# Altium footprint library ACB_PcbLib.PcbLib: 167 footprints (part 1 of 11)
Each footprint in its own frame and in the unit in brackets; x right, y up, seen from the top. Pads: shape width x height; smd on the part's side, far side on the other; paste and mask are expansions set on the pad; w line width, h text height; cw(c..) or ccw(c..) is an arc to the next point about the centre after c.
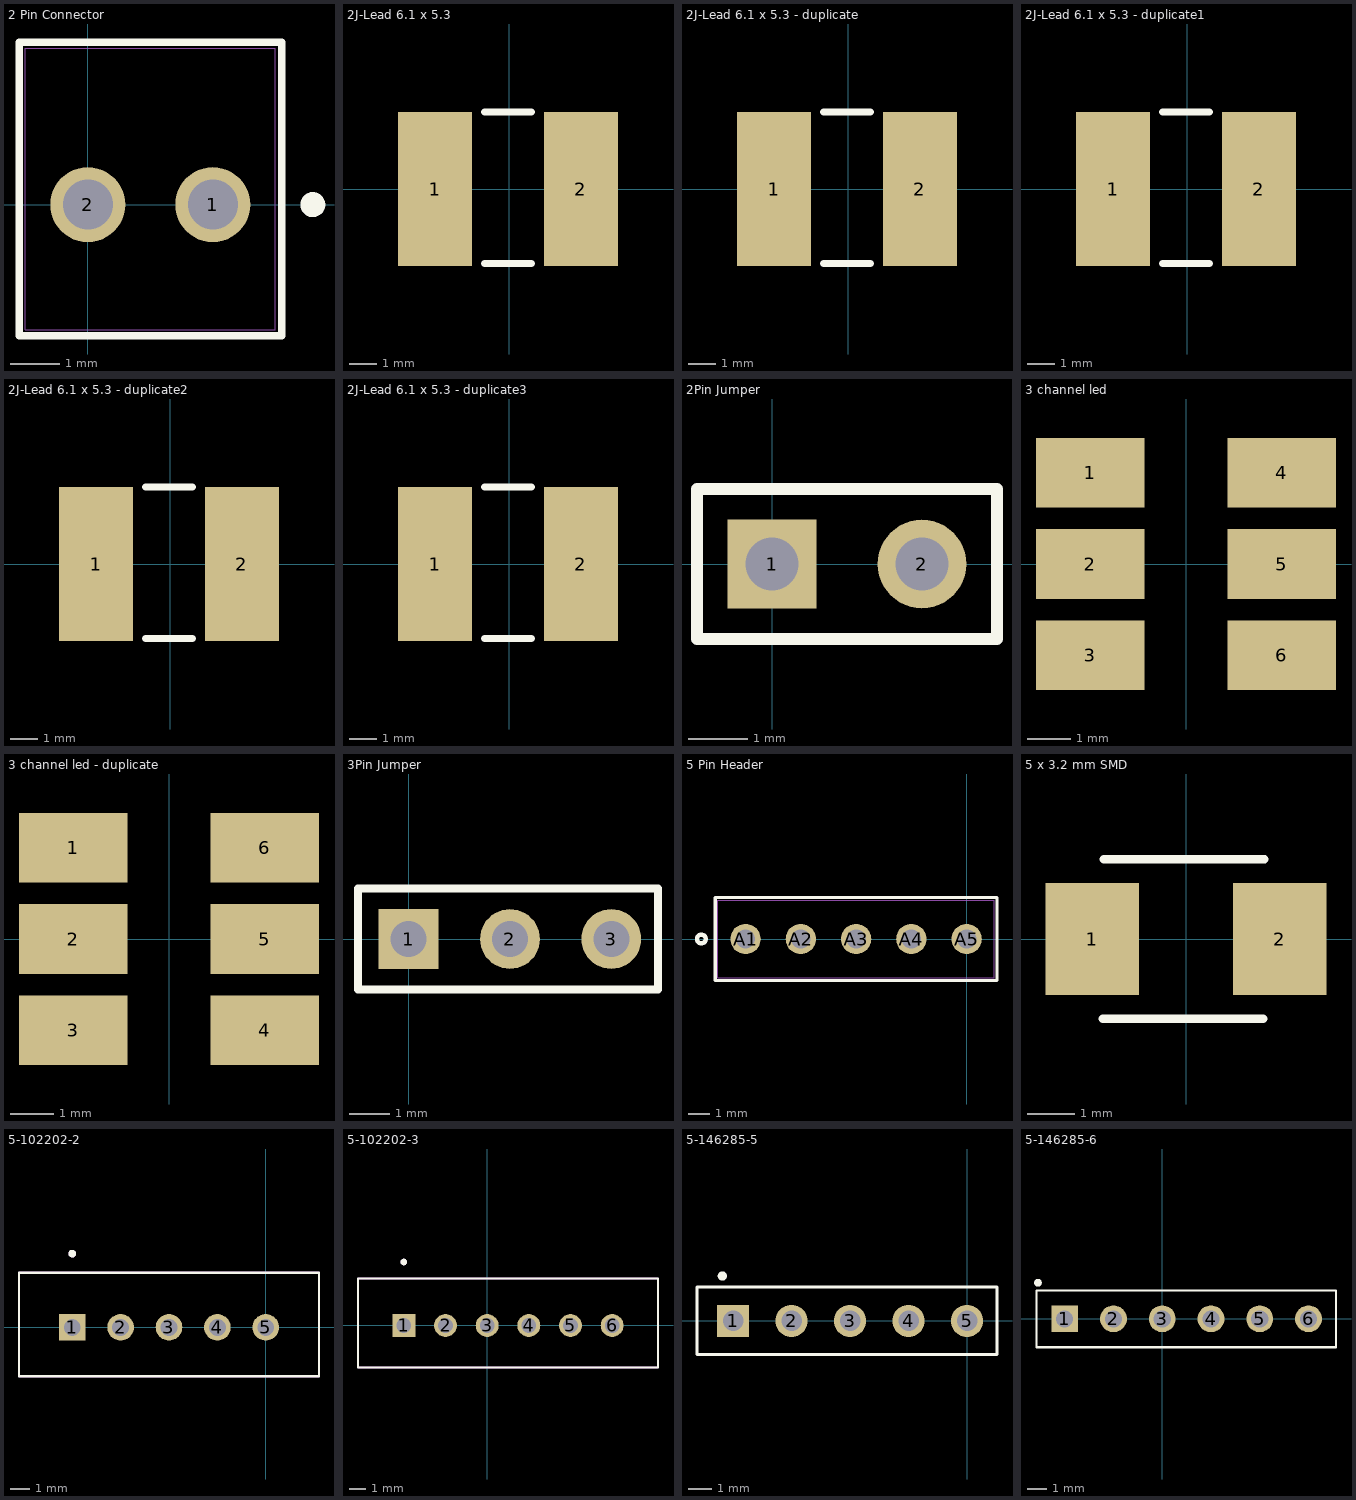
[diagram p0: the footprints below, top view; thin cyan lines are the x and y axes]

## 2 Pin Connector [mil] "640456-2 TE Connectivity"
pads (2):
  round 60 hole 40 mask-1000: 1(100,0) 2(0,0)
Top Overlay:
  circle w10: c180,0 r5
  lines w6: -55,-105 -55,130 155,130 155,-105 -55,-105
Bottom Overlay:
  circle w10: c180,0 r5
Top Paste:
  region: 0,30.26 -7.83,29.23 -15.13,26.2 -21.4,21.4 -26.2,15.13 -29.23,7.83 -30.26,0 -29.23,-7.83 -26.2,-15.13 -21.4,-21.4 -15.13,-26.2 -7.83,-29.23 0,-30.26 7.83,-29.23 15.13,-26.2 21.4,-21.4 26.2,-15.13 29.23,-7.83 30.26,0 29.23,7.83 26.2,15.13 21.4,21.4 15.13,26.2 7.83,29.23
  region: 100,30.26 92.17,29.23 84.87,26.2 78.6,21.4 73.8,15.13 70.77,7.83 69.74,0 70.77,-7.83 73.8,-15.13 78.6,-21.4 84.87,-26.2 92.17,-29.23 100,-30.26 107.83,-29.23 115.13,-26.2 121.4,-21.4 126.2,-15.13 129.23,-7.83 130.26,0 129.23,7.83 126.2,15.13 121.4,21.4 115.13,26.2 107.83,29.23
Top Solder:
  region: 0,30.26 -7.83,29.23 -15.13,26.2 -21.4,21.4 -26.2,15.13 -29.23,7.83 -30.26,0 -29.23,-7.83 -26.2,-15.13 -21.4,-21.4 -15.13,-26.2 -7.83,-29.23 0,-30.26 7.83,-29.23 15.13,-26.2 21.4,-21.4 26.2,-15.13 29.23,-7.83 30.26,0 29.23,7.83 26.2,15.13 21.4,21.4 15.13,26.2 7.83,29.23
  region: 100,30.26 92.17,29.23 84.87,26.2 78.6,21.4 73.8,15.13 70.77,7.83 69.74,0 70.77,-7.83 73.8,-15.13 78.6,-21.4 84.87,-26.2 92.17,-29.23 100,-30.26 107.83,-29.23 115.13,-26.2 121.4,-21.4 126.2,-15.13 129.23,-7.83 130.26,0 129.23,7.83 126.2,15.13 121.4,21.4 115.13,26.2 107.83,29.23
Bottom Solder:
  region: 0,30.26 -7.83,29.23 -15.13,26.2 -21.4,21.4 -26.2,15.13 -29.23,7.83 -30.26,0 -29.23,-7.83 -26.2,-15.13 -21.4,-21.4 -15.13,-26.2 -7.83,-29.23 0,-30.26 7.83,-29.23 15.13,-26.2 21.4,-21.4 26.2,-15.13 29.23,-7.83 30.26,0 29.23,7.83 26.2,15.13 21.4,21.4 15.13,26.2 7.83,29.23
  region: 100,30.26 92.17,29.23 84.87,26.2 78.6,21.4 73.8,15.13 70.77,7.83 69.74,0 70.77,-7.83 73.8,-15.13 78.6,-21.4 84.87,-26.2 92.17,-29.23 100,-30.26 107.83,-29.23 115.13,-26.2 121.4,-21.4 126.2,-15.13 129.23,-7.83 130.26,0 129.23,7.83 126.2,15.13 121.4,21.4 115.13,26.2 107.83,29.23
Mechanical 1:
  lines w1: -50,-100 -50,125 150,125 150,-100 -50,-100
3D body "c-640456-2-aa-3d.stp": height 400, standoff -135, extent -50.78,-106.75 149.22,123.25

## 2J-Lead 6.1 x 5.3 [mm]
pads (2):
  rect 2.7x5.6 smd: 1(-2.7,0) 2(2.6,0)
Top Overlay:
  lines w0.254: -0.9,-2.7 0.8,-2.7 ; -0.9,2.8 0.8,2.8
3D body: height 5, standoff 0.06, extent -3.4,-2.8 3.3,2.8

## 2J-Lead 6.1 x 5.3 - duplicate [mm]
pads (2):
  rect 2.7x5.6 smd: 1(-2.7,0) 2(2.6,0)
Top Overlay:
  lines w0.254: -0.9,-2.7 0.8,-2.7 ; -0.9,2.8 0.8,2.8
3D body: height 5, standoff 0.06, extent -3.4,-2.8 3.3,2.8

## 2J-Lead 6.1 x 5.3 - duplicate1 [mm]
pads (2):
  rect 2.7x5.6 smd: 1(-2.7,0) 2(2.6,0)
Top Overlay:
  lines w0.254: -0.9,-2.7 0.8,-2.7 ; -0.9,2.8 0.8,2.8
3D body: height 5, standoff 0.06, extent -3.4,-2.8 3.3,2.8

## 2J-Lead 6.1 x 5.3 - duplicate2 [mm]
pads (2):
  rect 2.7x5.6 smd: 1(-2.7,0) 2(2.6,0)
Top Overlay:
  lines w0.254: -0.9,-2.7 0.8,-2.7 ; -0.9,2.8 0.8,2.8
3D body: height 5, standoff 0.06, extent -3.4,-2.8 3.3,2.8

## 2J-Lead 6.1 x 5.3 - duplicate3 [mm]
pads (2):
  rect 2.7x5.6 smd: 1(-2.7,0) 2(2.6,0)
Top Overlay:
  lines w0.254: -0.9,-2.7 0.8,-2.7 ; -0.9,2.8 0.8,2.8
3D body: height 5, standoff 0.06, extent -3.4,-2.8 3.3,2.8

## 2Pin Jumper [mm] "2 Pin quick jumper"
pads (2):
  rect 1.5x1.5 hole 0.9: 1(0,0)
  round 1.5 hole 0.9: 2(2.54,0)
Top Overlay:
  lines w0.2: -1.27,-1.27 3.81,-1.27 3.81,1.27 -1.27,1.27 -1.27,-1.27
3D body "Pin Header 1x2 TH Pitch 2.54mm.stp": height 9.5, standoff -3.2, extent -1.27,-1.27 3.81,1.27

## 3 channel led [mm]
pads (6):
  rect 2.5x1.6 smd: 1(-2.2,2.1) 2(-2.2,0) 3(-2.2,-2.1) 4(2.2,2.1) 5(2.2,0) 6(2.2,-2.1)
3D body: height 2.5, standoff 0, extent -2.1,-2.8 2.2,2.8

## 3 channel led - duplicate [mm]
pads (6):
  rect 2.5x1.6 smd: 1(-2.2,2.1) 2(-2.2,0) 3(-2.2,-2.1) 4(2.2,-2.1) 5(2.2,0) 6(2.2,2.1)
3D body: height 2.5, standoff 0, extent -2.1,-2.8 2.2,2.8

## 3Pin Jumper [mm] "3 Pin quick jumper"
pads (3):
  rect 1.5x1.5 hole 0.9: 1(0,0)
  round 1.5 hole 0.9: 2(2.54,0) 3(5.08,0)
Top Overlay:
  lines w0.2: -1.27,-1.27 -1.27,1.27 6.25,1.27 6.25,-1.27 -1.27,-1.27
3D body "Pin Header 1x3 TH Pitch 2.54mm.stp": height 9.5, standoff -3.2, extent -1.27,-1.27 6.35,1.27

## 5 Pin Header [mil] "5 Pin Header 5-535541-3_5-535541-3(Primary)"
pads (5):
  round 55 hole 35 mask-1000: A1(-400,0) A2(-300,0) A3(-200,0) A4(-100,0) A5(0,0)
Top Overlay:
  circle w7.87: c-480,0 r7.87
  lines w6: -455,-75 -455,75 55,75 55,-75 -455,-75
Bottom Overlay:
Top Paste:
  region: 0,27.74 -7.18,26.79 -13.87,24.02 -19.61,19.61 -24.02,13.87 -26.79,7.18 -27.74,0 -26.79,-7.18 -24.02,-13.87 -19.61,-19.61 -13.87,-24.02 -7.18,-26.79 0,-27.74 7.18,-26.79 13.87,-24.02 19.61,-19.61 24.02,-13.87 26.79,-7.18 27.74,0 26.79,7.18 24.02,13.87 19.61,19.61 13.87,24.02 7.18,26.79
  region: -100,27.74 -107.18,26.79 -113.87,24.02 -119.61,19.61 -124.02,13.87 -126.79,7.18 -127.74,0 -126.79,-7.18 -124.02,-13.87 -119.61,-19.61 -113.87,-24.02 -107.18,-26.79 -100,-27.74 -92.82,-26.79 -86.13,-24.02 -80.39,-19.61 -75.98,-13.87 -73.21,-7.18 -72.26,0 -73.21,7.18 -75.98,13.87 -80.39,19.61 -86.13,24.02 -92.82,26.79
  region: -200,27.74 -207.18,26.79 -213.87,24.02 -219.61,19.61 -224.02,13.87 -226.79,7.18 -227.74,0 -226.79,-7.18 -224.02,-13.87 -219.61,-19.61 -213.87,-24.02 -207.18,-26.79 -200,-27.74 -192.82,-26.79 -186.13,-24.02 -180.39,-19.61 -175.98,-13.87 -173.21,-7.18 -172.26,0 -173.21,7.18 -175.98,13.87 -180.39,19.61 -186.13,24.02 -192.82,26.79
  region: -300,27.74 -307.18,26.79 -313.87,24.02 -319.61,19.61 -324.02,13.87 -326.79,7.18 -327.74,0 -326.79,-7.18 -324.02,-13.87 -319.61,-19.61 -313.87,-24.02 -307.18,-26.79 -300,-27.74 -292.82,-26.79 -286.13,-24.02 -280.39,-19.61 -275.98,-13.87 -273.21,-7.18 -272.26,0 -273.21,7.18 -275.98,13.87 -280.39,19.61 -286.13,24.02 -292.82,26.79
  region: -400,27.74 -407.18,26.79 -413.87,24.02 -419.61,19.61 -424.02,13.87 -426.79,7.18 -427.74,0 -426.79,-7.18 -424.02,-13.87 -419.61,-19.61 -413.87,-24.02 -407.18,-26.79 -400,-27.74 -392.82,-26.79 -386.13,-24.02 -380.39,-19.61 -375.98,-13.87 -373.21,-7.18 -372.26,0 -373.21,7.18 -375.98,13.87 -380.39,19.61 -386.13,24.02 -392.82,26.79
Top Solder:
  region: 0,27.74 -7.18,26.79 -13.87,24.02 -19.61,19.61 -24.02,13.87 -26.79,7.18 -27.74,0 -26.79,-7.18 -24.02,-13.87 -19.61,-19.61 -13.87,-24.02 -7.18,-26.79 0,-27.74 7.18,-26.79 13.87,-24.02 19.61,-19.61 24.02,-13.87 26.79,-7.18 27.74,0 26.79,7.18 24.02,13.87 19.61,19.61 13.87,24.02 7.18,26.79
  region: -100,27.74 -107.18,26.79 -113.87,24.02 -119.61,19.61 -124.02,13.87 -126.79,7.18 -127.74,0 -126.79,-7.18 -124.02,-13.87 -119.61,-19.61 -113.87,-24.02 -107.18,-26.79 -100,-27.74 -92.82,-26.79 -86.13,-24.02 -80.39,-19.61 -75.98,-13.87 -73.21,-7.18 -72.26,0 -73.21,7.18 -75.98,13.87 -80.39,19.61 -86.13,24.02 -92.82,26.79
  region: -200,27.74 -207.18,26.79 -213.87,24.02 -219.61,19.61 -224.02,13.87 -226.79,7.18 -227.74,0 -226.79,-7.18 -224.02,-13.87 -219.61,-19.61 -213.87,-24.02 -207.18,-26.79 -200,-27.74 -192.82,-26.79 -186.13,-24.02 -180.39,-19.61 -175.98,-13.87 -173.21,-7.18 -172.26,0 -173.21,7.18 -175.98,13.87 -180.39,19.61 -186.13,24.02 -192.82,26.79
  region: -300,27.74 -307.18,26.79 -313.87,24.02 -319.61,19.61 -324.02,13.87 -326.79,7.18 -327.74,0 -326.79,-7.18 -324.02,-13.87 -319.61,-19.61 -313.87,-24.02 -307.18,-26.79 -300,-27.74 -292.82,-26.79 -286.13,-24.02 -280.39,-19.61 -275.98,-13.87 -273.21,-7.18 -272.26,0 -273.21,7.18 -275.98,13.87 -280.39,19.61 -286.13,24.02 -292.82,26.79
  region: -400,27.74 -407.18,26.79 -413.87,24.02 -419.61,19.61 -424.02,13.87 -426.79,7.18 -427.74,0 -426.79,-7.18 -424.02,-13.87 -419.61,-19.61 -413.87,-24.02 -407.18,-26.79 -400,-27.74 -392.82,-26.79 -386.13,-24.02 -380.39,-19.61 -375.98,-13.87 -373.21,-7.18 -372.26,0 -373.21,7.18 -375.98,13.87 -380.39,19.61 -386.13,24.02 -392.82,26.79
Bottom Solder:
  region: 0,27.74 -7.18,26.79 -13.87,24.02 -19.61,19.61 -24.02,13.87 -26.79,7.18 -27.74,0 -26.79,-7.18 -24.02,-13.87 -19.61,-19.61 -13.87,-24.02 -7.18,-26.79 0,-27.74 7.18,-26.79 13.87,-24.02 19.61,-19.61 24.02,-13.87 26.79,-7.18 27.74,0 26.79,7.18 24.02,13.87 19.61,19.61 13.87,24.02 7.18,26.79
  region: -100,27.74 -107.18,26.79 -113.87,24.02 -119.61,19.61 -124.02,13.87 -126.79,7.18 -127.74,0 -126.79,-7.18 -124.02,-13.87 -119.61,-19.61 -113.87,-24.02 -107.18,-26.79 -100,-27.74 -92.82,-26.79 -86.13,-24.02 -80.39,-19.61 -75.98,-13.87 -73.21,-7.18 -72.26,0 -73.21,7.18 -75.98,13.87 -80.39,19.61 -86.13,24.02 -92.82,26.79
  region: -200,27.74 -207.18,26.79 -213.87,24.02 -219.61,19.61 -224.02,13.87 -226.79,7.18 -227.74,0 -226.79,-7.18 -224.02,-13.87 -219.61,-19.61 -213.87,-24.02 -207.18,-26.79 -200,-27.74 -192.82,-26.79 -186.13,-24.02 -180.39,-19.61 -175.98,-13.87 -173.21,-7.18 -172.26,0 -173.21,7.18 -175.98,13.87 -180.39,19.61 -186.13,24.02 -192.82,26.79
  region: -300,27.74 -307.18,26.79 -313.87,24.02 -319.61,19.61 -324.02,13.87 -326.79,7.18 -327.74,0 -326.79,-7.18 -324.02,-13.87 -319.61,-19.61 -313.87,-24.02 -307.18,-26.79 -300,-27.74 -292.82,-26.79 -286.13,-24.02 -280.39,-19.61 -275.98,-13.87 -273.21,-7.18 -272.26,0 -273.21,7.18 -275.98,13.87 -280.39,19.61 -286.13,24.02 -292.82,26.79
  region: -400,27.74 -407.18,26.79 -413.87,24.02 -419.61,19.61 -424.02,13.87 -426.79,7.18 -427.74,0 -426.79,-7.18 -424.02,-13.87 -419.61,-19.61 -413.87,-24.02 -407.18,-26.79 -400,-27.74 -392.82,-26.79 -386.13,-24.02 -380.39,-19.61 -375.98,-13.87 -373.21,-7.18 -372.26,0 -373.21,7.18 -375.98,13.87 -380.39,19.61 -386.13,24.02 -392.82,26.79
Mechanical 1:
  lines w1: -450,-70 -450,70 50,70 50,-70 -450,-70
3D body "5-535541-3.step": height 245, standoff -170, extent -451.77,-69.88 48.23,70.12

## 5 x 3.2 mm SMD [mm]
pads (2):
  rect 2x2.4 smd: 1(-2,0) 2(2,0)
Top Overlay:
  lines w0.178: -1.779,-1.7 1.65,-1.7 ; -1.754,1.7 1.675,1.7
3D body: height 1.2, standoff 0, extent -2.5,-1.6 2.5,1.6

## 5-102202-2 [mm] "5-Pin single row header"
pads (5):
  rect 1.398x1.398 hole 0.89: 1(-10.16,0)
  round 1.398 hole 0.89: 2(-7.62,0) 3(-5.08,0) 4(-2.54,0) 5(0,0)
Top Overlay:
  circle w0.2: c-10.16,3.87 r0.1
  lines w0.127: -12.955,-2.57 2.795,-2.57 2.795,2.87 -12.955,2.87 -12.955,-2.57
Mechanical 4:
  circle w0.2: c-10.16,3.87 r0.1
  circle w0.2: c-10.16,3.87 r0.1
  lines w0.127: -12.955,-2.57 2.795,-2.57 ; -12.955,-2.57 -12.955,2.87 ; -12.955,-2.57 2.795,-2.57 ; -12.955,-2.57 -12.955,2.87 ; -12.955,2.87 2.795,2.87 ; -12.955,2.87 2.795,2.87 ; 2.795,-2.57 2.795,2.87 ; 2.795,-2.57 2.795,2.87
3D body "c-5-102202-2-p-3d.stp": height 14, standoff -3.25, extent -12.954,-2.935 2.794,2.818

## 5-102202-3 [mm]
pads (6):
  rect 1.398x1.398 hole 0.89: 1(-5.08,0)
  round 1.398 hole 0.89: 2(-2.54,0) 3(0,0) 4(2.54,0) 5(5.08,0) 6(7.62,0)
Top Overlay:
  circle w0.2: c-5.08,3.87 r0.1
  lines w0.127: -7.875,-2.57 -7.875,2.87 10.415,2.87 10.415,-2.57 -7.875,-2.57
Mechanical 4:
  circle w0.2: c-5.08,3.87 r0.1
  circle w0.2: c-5.08,3.87 r0.1
  lines w0.127: -7.875,-2.57 -7.875,2.87 ; -7.875,-2.57 10.415,-2.57 ; -7.875,-2.57 -7.875,2.87 ; -7.875,-2.57 10.415,-2.57 ; -7.875,2.87 10.415,2.87 ; -7.875,2.87 10.415,2.87 ; 10.415,-2.57 10.415,2.87 ; 10.415,-2.57 10.415,2.87
3D body "c-5-102202-3-p-3d.stp": height 14, standoff -3.25, extent -7.904,-3.035 10.384,2.718

## 5-146285-5 [mm] "5-Pin single row header"
pads (5):
  rect 1.398x1.398 hole 0.89: 1(-10.16,0)
  round 1.398 hole 0.89: 2(-7.62,0) 3(-5.08,0) 4(-2.54,0) 5(0,0)
Top Overlay:
  circle w0.2: c-10.625,1.95 r0.1
  lines w0.127: -11.725,-1.45 -11.725,1.475 1.3,1.475 1.3,-1.45 -11.725,-1.45
3D body "Pin Header 1x5 TH Pitch 2.54mm.stp": height 9.5, standoff -3.2, extent -11.52,-1.27 1.18,1.27

## 5-146285-6 [mm] "6-pin Header"
pads (6):
  rect 1.398x1.398 hole 0.89: 1(-5.08,0)
  round 1.398 hole 0.89: 2(-2.54,0) 3(0,0) 4(2.54,0) 5(5.08,0) 6(7.62,0)
Top Overlay:
  circle w0.2: c-6.475,1.875 r0.1
  lines w0.127: -6.55,-1.475 -6.55,1.475 9.05,1.475 9.05,-1.475 -6.55,-1.475
3D body "Pin Header 1x6 TH Pitch 2.54mm.stp": height 9.5, standoff -3.2, extent -6.37,-1.27 8.87,1.27